# Altium schematic symbol library IT_SENSOR_PCB.SchLib: 1 symbol
Pins are listed as number, name and electrical type; pins without a type are passive.

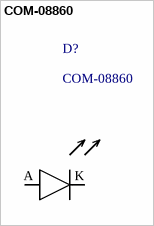
[diagram p0: symbol COM-08860]

## COM-08860
designator D?
Blue 10mm THT LED
footprint LED_10MM_COM-08860
pins: A ANODE, K CATHODE